# Altium footprint library LimeMicroAltiumLib.PcbLib: 876 footprints (part 10 of 57)
Each footprint in its own frame and in the unit in brackets; x right, y up, seen from the top. Pads: shape width x height; smd on the part's side, far side on the other; paste and mask are expansions set on the pad; w line width, h text height; cw(c..) or ccw(c..) is an arc to the next point about the centre after c.
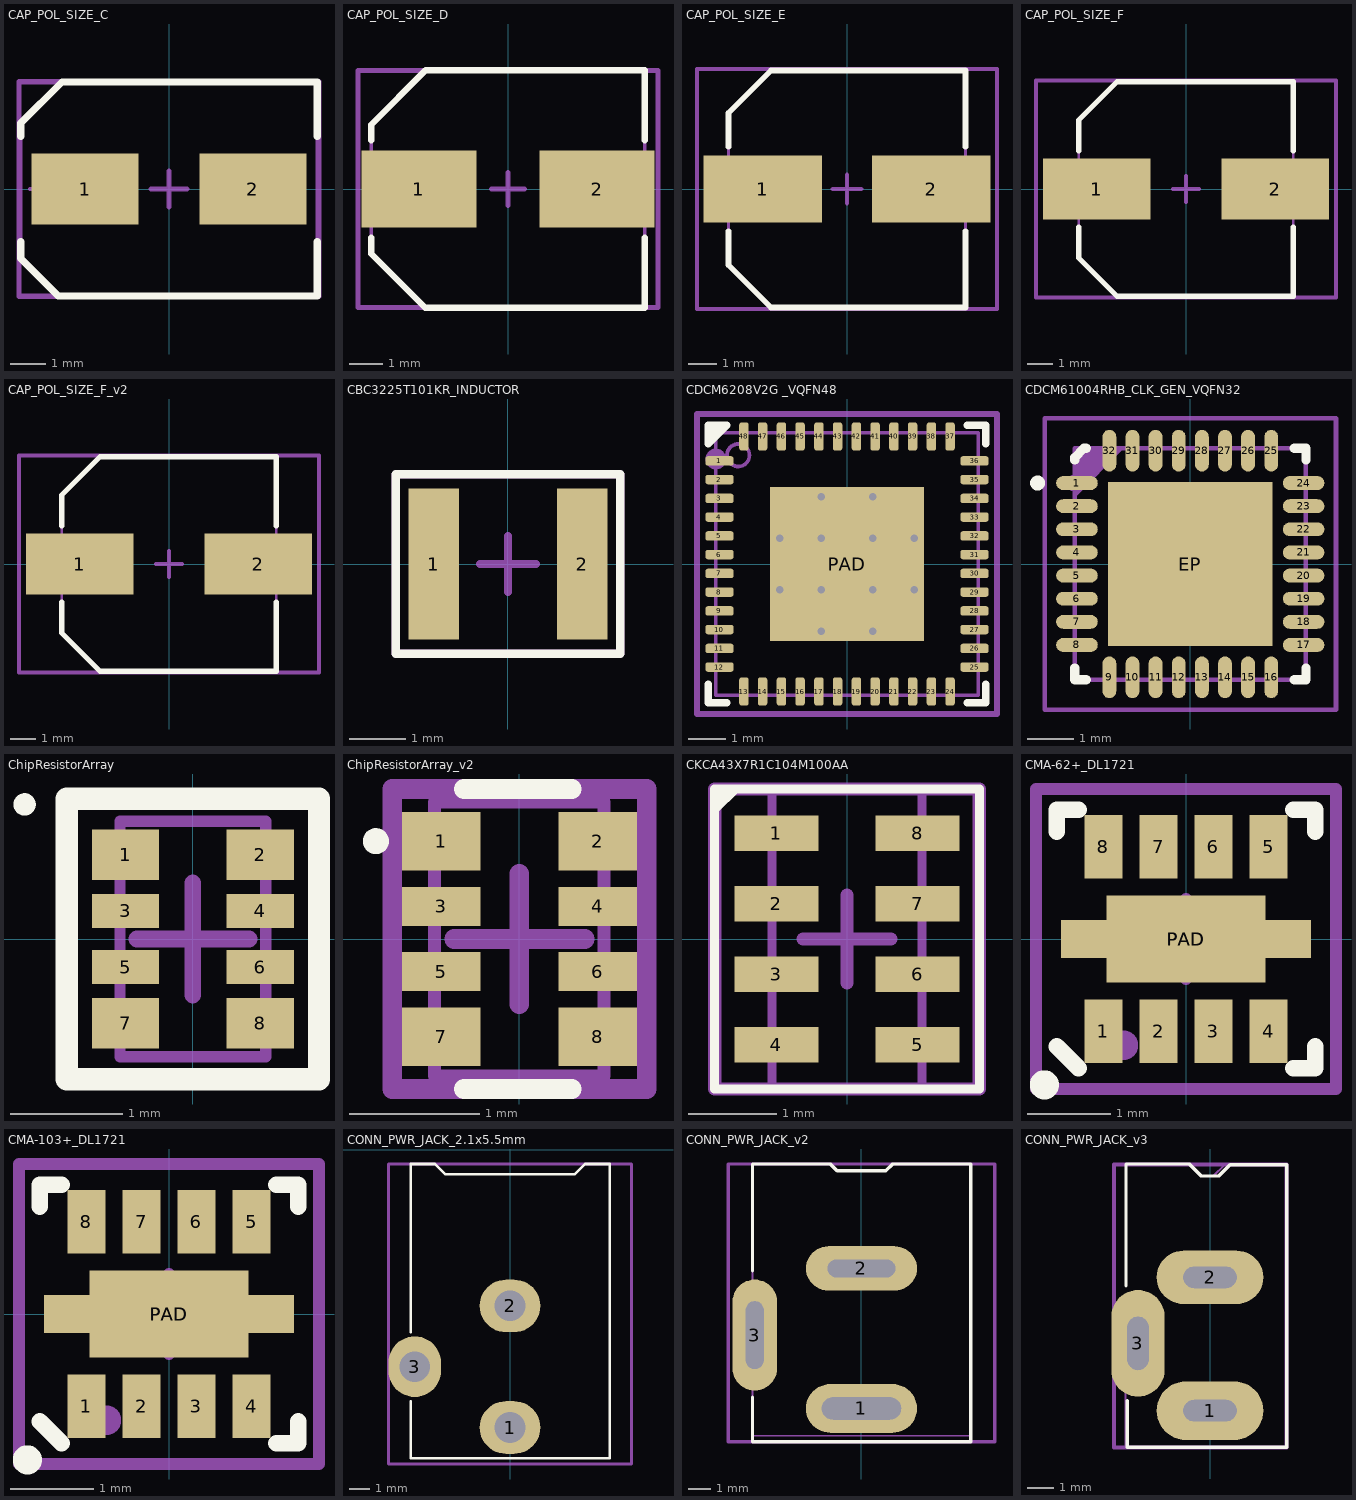
[diagram p9: the footprints below, top view; thin cyan lines are the x and y axes]

## CAP_POL_SIZE_C [mm]
height 10.5
pads (2):
  rect 3x2 smd: 1(-2.35,0) 2(2.35,0)
Top Overlay:
  lines w0.2: -4.15,-1.475 -4.15,-1.95 -3.1,-3 4.15,-3 4.15,-1.475 ; -4.15,1.475 -4.15,1.85 -3,3 4.15,3 4.15,1.475
Mechanical 13:
  lines w0.1: -4.15,-1.95 -4.15,1.85 -3,3 4.15,3 4.15,-3 -3.1,-3 -4.15,-1.95
Mechanical 15:
  lines w0.1: -3.9,0 -2.4,0 ; -3.15,-0.75 -3.15,0.75
  lines w0.15: -0.5,0 0.5,0 ; 0,-0.5 0,0.5 ; -4.2,-3 4.2,-3 4.2,3 -4.2,3 -4.2,-3
  text ".Designator" at 0,0 h0.55
3D body "User Library-capacitor size C.step": height 5.41, standoff -0.01, extent -2.95,-2.65 2.95,2.65

## CAP_POL_SIZE_D [mm]
height 10.5
pads (2):
  rect 3.5x2.35 smd: 1(-2.7,0) 2(2.7,0)
Top Overlay:
  lines w0.2: -4.15,-1.475 -4.15,-1.962 -2.512,-3.6 4.15,-3.6 4.15,-1.475 ; -4.15,1.475 -4.15,1.95 -2.5,3.6 4.15,3.6 4.15,1.475
Mechanical 13:
  lines w0.1: -4.15,-1.95 -4.15,1.95 -2.5,3.6 4.15,3.6 4.15,-3.6 -2.5,-3.6 -4.15,-1.95
Mechanical 15:
  lines w0.1: -3.65,0 -2.15,0 ; -2.9,-0.75 -2.9,0.75
  lines w0.15: -0.5,0 0.5,0 ; 0,-0.5 0,0.5 ; -4.55,-3.6 4.55,-3.6 4.55,3.6 -4.55,3.6 -4.55,-3.6
  text ".Designator" at 0,0 h0.55
3D body "EDK476M035A9GAA.step": height 5.66, standoff 0, extent -3.8,-3.4 3.8,3.4

## CAP_POL_SIZE_E [mm]
height 10.5
pads (2):
  rect 4.15x2.35 smd: 1(-2.95,0) 2(2.95,0)
Top Overlay:
  lines w0.2: -4.15,-1.475 -4.15,-2.663 -2.663,-4.15 4.15,-4.15 4.15,-1.475 ; -4.15,1.475 -4.15,2.662 -2.663,4.15 4.15,4.15 4.15,1.475
Mechanical 13:
  lines w0.1: -4.15,-2.663 -2.663,-4.15 4.15,-4.15 4.15,4.15 -2.663,4.15 -4.15,2.662 -4.15,-2.663
Mechanical 15:
  lines w0.1: -4.9,0 -3.4,0 ; -4.15,-0.75 -4.15,0.75
  lines w0.15: -0.5,0 0.5,0 ; 0,-0.5 0,0.5 ; -5.25,-4.2 -5.25,4.2 5.25,4.2 5.25,-4.2 -5.25,-4.2
  text ".Designator" at 0,0 h0.55
3D body "User Library-capacitor size E.step": height 6.2, standoff -0.01, extent -4.5,-4.15 4.5,4.15

## CAP_POL_SIZE_F [mm]
height 10.5
pads (2):
  rect 4.15x2.35 smd: 1(-3.45,0) 2(3.45,0)
Top Overlay:
  lines w0.2: -4.15,-1.475 -4.15,-2.663 -2.663,-4.15 4.15,-4.15 4.15,-1.475 ; -4.15,1.475 -4.15,2.662 -2.663,4.15 4.15,4.15 4.15,1.475
Mechanical 13:
  lines w0.1: -4.15,-2.663 -2.663,-4.15 4.15,-4.15 4.15,4.15 -2.663,4.15 -4.15,2.662 -4.15,-2.663
Mechanical 15:
  lines w0.1: -4.9,0 -3.4,0 ; -4.15,-0.75 -4.15,0.75
  lines w0.15: -0.5,0 0.5,0 ; 0,-0.5 0,0.5 ; -5.8,-4.2 -5.8,4.2 5.8,4.2 5.8,-4.2 -5.8,-4.2
  text ".Designator" at 0,0 h0.55
3D body "User Library-capacitor size F.step": height 10.21, standoff -0.01, extent -4.95,-4.15 4.95,4.15

## CAP_POL_SIZE_F_v2 [mm]
height 10.5
pads (2):
  rect 4.15x2.35 smd: 1(-3.45,0) 2(3.45,0)
Top Overlay:
  lines w0.2: -4.15,-1.475 -4.15,-2.663 -2.663,-4.15 4.15,-4.15 4.15,-1.475 ; -4.15,1.475 -4.15,2.662 -2.663,4.15 4.15,4.15 4.15,1.475
Mechanical 13:
  lines w0.1: -4.15,-2.663 -4.15,2.662 -2.663,4.15 4.15,4.15 4.15,-4.15 -2.663,-4.15 -4.15,-2.663
Mechanical 15:
  lines w0.1: -4.9,0 -3.4,0 ; -4.15,-0.75 -4.15,0.75
  lines w0.15: -0.5,0 0.5,0 ; 0,-0.5 0,0.5 ; -5.8,-4.2 5.8,-4.2 5.8,4.2 -5.8,4.2 -5.8,-4.2
  text ".Designator" at 0,0 h0.55
3D body "User Library-capasitores electroliticos.step": height 5.55, standoff 0, extent -3.625,-3.3 3.575,3.3

## CBC3225T101KR_INDUCTOR [mm] "Power inductor CBC3225T101KR, 0.34A"
pads (2):
  rect 0.9x2.7 smd mask+0.05: 1(-1.325,0) 2(1.325,0)
Top Overlay:
  lines w0.15: -2,-1.6 2,-1.6 2,1.6 -2,1.6 -2,-1.6
Mechanical 15:
  lines w0.15: -0.5,0 0.5,0 ; 0,-0.5 0,0.5 ; -2,-1.6 2,-1.6 2,1.6 -2,1.6 -2,-1.6
  text ".Designator" at 0,0 h0.55
  text "No polarity" at -1.6,-1.3 h0.3
3D body "User Library-CBC3225.step": height 2.5, standoff 0, extent -1.575,-1.25 1.625,1.25

## CDCM6208V2G _VQFN48 [mm] "48-VQFN package 7x7 mm"
pads (49):
  rrect50% 0.75x0.25 smd mask+0.05: 1(-3.4,2.75) 2(-3.4,2.25) 3(-3.4,1.75) 4(-3.4,1.25) 5(-3.4,0.75) 6(-3.4,0.25) 7(-3.4,-0.25) 8(-3.4,-0.75) 9(-3.4,-1.25) 10(-3.4,-1.75) 11(-3.4,-2.25) 12(-3.4,-2.75) 25(3.4,-2.75) 26(3.4,-2.25) 27(3.4,-1.75) 28(3.4,-1.25) 29(3.4,-0.75) 30(3.4,-0.25) 31(3.4,0.25) 32(3.4,0.75) 33(3.4,1.25) 34(3.4,1.75) 35(3.4,2.25) 36(3.4,2.75)
  rrect50% 0.25x0.75 smd mask+0.05: 13(-2.75,-3.4) 14(-2.25,-3.4) 15(-1.75,-3.4) 16(-1.25,-3.4) 17(-0.75,-3.4) 18(-0.25,-3.4) 19(0.25,-3.4) 20(0.75,-3.4) 21(1.25,-3.4) 22(1.75,-3.4) 23(2.25,-3.4) 24(2.75,-3.4) 37(2.75,3.4) 38(2.25,3.4) 39(1.75,3.4) 40(1.25,3.4) 41(0.75,3.4) 42(0.25,3.4) 43(-0.25,3.4) 44(-0.75,3.4) 45(-1.25,3.4) 46(-1.75,3.4) 47(-2.25,3.4) 48(-2.75,3.4)
  rect 4.1x4.1 smd paste-5 mask+0.05: PAD(0,0)
via 0.685,0.685 diameter 0.4 hole 0.2
via 0.685,1.8 diameter 0.4 hole 0.2
via 1.8,0.685 diameter 0.4 hole 0.2
via -1.8,0.685 diameter 0.4 hole 0.2
via -0.685,1.8 diameter 0.4 hole 0.2
via -0.685,0.685 diameter 0.4 hole 0.2
via -0.685,-0.685 diameter 0.4 hole 0.2
via -0.685,-1.8 diameter 0.4 hole 0.2
via -1.8,-0.685 diameter 0.4 hole 0.2
via 1.8,-0.685 diameter 0.4 hole 0.2
via 0.685,-1.8 diameter 0.4 hole 0.2
via 0.685,-0.685 diameter 0.4 hole 0.2
Top Overlay:
  region: -3.7,3.25 -3.25,3.7 -3.7,3.7
  lines w0.2: -3.7,-3.2 -3.7,-3.7 -3.2,-3.7 ; 3.2,-3.7 3.7,-3.7 3.7,-3.2 ; 3.2,3.7 3.7,3.7 3.7,3.2 ; -3.7,3.2 -3.2,3.7 -3.7,3.7 -3.7,3.2
Top Paste:
  drawing of 9 lines, arcs and shapes, not listed
Mechanical 13:
  circle w0.1: c-2.9,2.9 r0.3
  lines w0.1: -3.5,-3.5 3.5,-3.5 3.5,3.5 -3.5,3.5 -3.5,-3.5
Mechanical 15:
  circle w0.35: c-3.5,2.8 r0.1
  lines w0.15: -0.5,0 0.5,0 ; 0,-0.5 0,0.5 ; -4,-4 4,-4 4,4 -4,4 -4,-4
  text ".Designator" at 0,0 h0.55
3D body "ALSRobot-QFN48 7x7.step": height 0.78, standoff -0.02, extent -3.51,-3.51 3.51,3.51

## CDCM61004RHB_CLK_GEN_VQFN32 [mm]
pads (33):
  oval 0.9x0.3 smd mask+0.05: 1(-2.45,1.75) 2(-2.45,1.25) 3(-2.45,0.75) 4(-2.45,0.25) 5(-2.45,-0.25) 6(-2.45,-0.75) 7(-2.45,-1.25) 8(-2.45,-1.75) 17(2.45,-1.75) 18(2.45,-1.25) 19(2.45,-0.75) 20(2.45,-0.25) 21(2.45,0.25) 22(2.45,0.75) 23(2.45,1.25) 24(2.45,1.75)
  oval 0.3x0.9 smd mask+0.05: 9(-1.75,-2.45) 10(-1.25,-2.45) 11(-0.75,-2.45) 12(-0.25,-2.45) 13(0.25,-2.45) 14(0.75,-2.45) 15(1.25,-2.45) 16(1.75,-2.45) 25(1.75,2.45) 26(1.25,2.45) 27(0.75,2.45) 28(0.25,2.45) 29(-0.25,2.45) 30(-0.75,2.45) 31(-1.25,2.45) 32(-1.75,2.45)
  rect 3.55x3.55 smd paste-0.65 mask+0.05: EP(0,0)
Top Overlay:
  circle w0.25: c-3.3,1.75 r0.035
  lines w0.2: -2.5,-2.25 -2.5,-2.5 -2.25,-2.5 ; -2.5,2.25 -2.5,2.3 -2.3,2.5 -2.25,2.5 ; 2.25,-2.5 2.5,-2.5 2.5,-2.25 ; 2.25,2.5 2.5,2.5 2.5,2.25
Mechanical 13:
  lines w0.1: -2.5,1.5 -1.5,2.5 ; -2.5,1.6 -1.6,2.5 ; -2.5,1.7 -1.7,2.5 ; -2.5,1.8 -1.8,2.5 ; -2.5,1.9 -1.9,2.5 ; -2.5,2 -2,2.5 ; -2.5,2.1 -2.1,2.5 ; -2.5,2.2 -2.2,2.5 ; -2.5,2.3 -2.3,2.5 ; -2.5,2.4 -2.4,2.5 ; -2.5,-2.5 2.5,-2.5 2.5,2.5 -2.5,2.5 -2.5,-2.5
Mechanical 15:
  circle w0.2: c-2.525,1.75 r0.071
  lines w0.1: -0.5,0 0.5,0 ; 0,-0.5 0,0.5 ; -3.15,-3.15 3.15,-3.15 3.15,3.15 -3.15,3.15 -3.15,-3.15
  text ".Designator" at 0,0 h0.55
3D body "QFN50P500X500X100-33N-S355.stp": height 1, standoff 0, extent -2.5,-2.5 2.5,2.5

## ChipResistorArray [mm] "Chip Array, Flat, 8-Leads, Pitch 0,60mm,  Body 2,05x1,05mm,  IPC Medium Density"
height 0.5
pads (8):
  rect 0.6x0.45 smd mask+0.05: 1(-0.6,0.75) 2(0.6,0.75) 7(-0.6,-0.75) 8(0.6,-0.75)
  rect 0.6x0.3 smd mask+0.05: 3(-0.6,0.25) 4(0.6,0.25) 5(-0.6,-0.25) 6(0.6,-0.25)
Top Overlay:
  circle w0.1: c-1.5,1.2 r0.05
  lines w0.2: -1.125,-1.25 1.125,-1.25 1.125,1.25 -1.125,1.25 -1.125,-1.25
Top Solder:
  region: 0.25,-1.025 0.25,1.025 0.95,1.025 0.95,-1.025
  region: -0.95,-1.025 -0.95,1.025 -0.25,1.025 -0.25,-1.025
Mechanical 13:
  lines w0.1: -0.65,-1.05 0.65,-1.05 0.65,1.05 -0.65,1.05 -0.65,-1.05
Mechanical 15:
  lines w0.15: -0.5,0 0.5,0 ; 0,-0.5 0,0.5 ; -1.1,-1.25 1.1,-1.25 1.1,1.25 -1.1,1.25 -1.1,-1.25
  text ".Designator" at 0,0 h0.55
3D body "User Library-CAT10-103.STEP": height 0.4, standoff 0, extent -0.525,-1.025 0.475,0.975

## ChipResistorArray_v2 [mm] "Chip Array, Flat, 8-Leads, Pitch 0,60mm,  Body 2,05x1,05mm,  IPC Medium Density"
height 0.5
pads (8):
  rect 0.6x0.45 smd mask+0.01: 1(-0.6,0.75) 2(0.6,0.75) 7(-0.6,-0.75) 8(0.6,-0.75)
  rect 0.6x0.3 smd mask+0.01: 3(-0.6,0.25) 4(0.6,0.25) 5(-0.6,-0.25) 6(0.6,-0.25)
Top Overlay:
  circle w0.1: c-1.1,0.75 r0.05
  lines w0.15: -0.425,-1.15 0.4,-1.15 ; -0.425,1.15 0.4,1.15
Mechanical 13:
  lines w0.1: -0.65,-1.05 -0.65,1.05 0.65,1.05 0.65,-1.05 -0.65,-1.05
Mechanical 15:
  circle w0.1: c-0.6,0.75 r0.05
  lines w0.15: -0.5,0 0.5,0 ; 0,-0.5 0,0.5 ; -0.975,-1.15 -0.975,1.15 0.975,1.15 0.975,-1.15 -0.975,-1.15
  text ".Designator" at 0,0 h0.55
3D body "User Library-CAT10-103.STEP": height 0.4, standoff 0, extent -0.525,-1.025 0.475,0.975

## CKCA43X7R1C104M100AA [mm]
height 1
pads (8):
  rect 0.95x0.4 smd: 1(-0.8,1.2) 2(-0.8,0.4) 3(-0.8,-0.4) 4(-0.8,-1.2) 5(0.8,-1.2) 6(0.8,-0.4) 7(0.8,0.4) 8(0.8,1.2)
Top Overlay:
  region: -1.5,1.4 -1.2,1.7 -1.5,1.7
  lines w0.1: -1.5,-1.7 1.5,-1.7 1.5,1.7 -1.5,1.7 -1.5,-1.7
Mechanical 13:
  lines w0.1: -0.85,-1.7 -0.85,1.7 0.85,1.7 0.85,-1.7 -0.85,-1.7
Mechanical 15:
  circle w0.15: c-0.9,1.2 r0.05
  lines w0.15: -0.5,0 0.5,0 ; 0,-0.5 0,0.5 ; -1.5,-1.7 -1.5,1.7 1.5,1.7 1.5,-1.7 -1.5,-1.7
  text ".Designator" at 0,0 h0.55
3D body "User Library-TC164.step": height 0.55, standoff 0, extent -0.8,-1.6 0.8,1.6

## CMA-62+_DL1721 [mm] "Quad Flat No Lead, Plastic; 16 Terminals; Body 3 x 3 mm; Pitch 0.5 mm"
height 0.8
pads (10):
  rect 0.46x0.76 smd mask+0.05: 1(-0.99,-1.105) 2(-0.33,-1.105) 3(0.33,-1.105) 4(0.99,-1.105) 5(0.99,1.105) 6(0.33,1.105) 7(-0.33,1.105) 8(-0.99,1.105)
  rect 3x0.46 smd mask+0.05: PAD(0,0)
  rect 1.91x1.04 smd mask+0.05: PAD(0,0)
Top Overlay:
  circle w0.25: c-1.7,-1.75 r0.05
  lines w0.2: -1.55,-1.29 -1.29,-1.55 ; -1.55,1.29 -1.55,1.55 -1.29,1.55 ; 1.29,-1.55 1.55,-1.55 1.55,-1.29 ; 1.29,1.55 1.55,1.55 1.55,1.29
Mechanical 15:
  circle w0.3: c-0.75,-1.275 r0.025
  lines w0.15: -0.475,0 0,0 ; 0,-0.475 0,0 ; 0,0.475 0,0 ; 0.475,0 0,0 ; -1.8,-1.8 -1.8,1.8 1.8,1.8 1.8,-1.8 -1.8,-1.8
  text ".Designator" at 0,0 h0.55
3D body "User Library-DFN-8.STEP": height 0.8, standoff 0, extent -1.5,-1.51 1.5,1.51

## CMA-103+_DL1721 [mm] "Quad Flat No Lead, Plastic; 16 Terminals; Body 3 x 3 mm; Pitch 0.5 mm"
height 0.8
pads (10):
  rect 0.46x0.76 smd mask+0.05: 1(-0.99,-1.105) 2(-0.33,-1.105) 3(0.33,-1.105) 4(0.99,-1.105) 5(0.99,1.105) 6(0.33,1.105) 7(-0.33,1.105) 8(-0.99,1.105)
  rect 3x0.46 smd mask+0.05: PAD(0,0)
  rect 1.91x1.04 smd mask+0.05: PAD(0,0)
Top Overlay:
  circle w0.25: c-1.7,-1.75 r0.05
  lines w0.2: -1.55,-1.29 -1.29,-1.55 ; -1.55,1.29 -1.55,1.55 -1.29,1.55 ; 1.29,-1.55 1.55,-1.55 1.55,-1.29 ; 1.29,1.55 1.55,1.55 1.55,1.29
Mechanical 15:
  circle w0.3: c-0.75,-1.275 r0.025
  lines w0.15: -0.475,0 0,0 ; 0,-0.475 0,0 ; 0,0.475 0,0 ; 0.475,0 0,0 ; -1.8,-1.8 -1.8,1.8 1.8,1.8 1.8,-1.8 -1.8,-1.8
  text ".Designator" at 0,0 h0.55
3D body "User Library-DFN-8.STEP": height 0.8, standoff 0, extent -1.5,-1.51 1.5,1.51

## CONN_PWR_JACK_2.1x5.5mm [mm] "Power Connector, 2.1mm ID, 5.5mm OD"
height 11
pads (3):
  oval 3x2.6 hole 1.511: 1(0,-13.7) 2(0,-7.7)
  oval 2.6x3 hole 1.511: 3(-4.7,-10.7)
Top Overlay:
  lines w0.127: -4.9,-12.4 -4.9,-15.225 4.925,-15.225 4.925,-0.7 3.7,-0.7 3.2,-1.2 -3.2,-1.2 -3.7,-0.7 -4.9,-0.7 -4.9,-9
Mechanical 13:
  lines w0.076: -4.9,-12.4 -4.9,-15.225 4.925,-15.225 4.925,-0.7 3.7,-0.7 3.2,-1.2 -3.2,-1.2 -3.7,-0.7 -4.9,-0.7 -4.9,-9
Mechanical 15:
  lines w0.15: -6,-15.5 6,-15.5 6,-0.7 -6,-0.7 -6,-15.5
  text ".Designator" at 0,-7.7 h0.55
3D body "3100-522 Connector.stp": height 11, standoff -3.5, extent -4.9,-14.1 4.5,0

## CONN_PWR_JACK_v2 [mm] "Power Connector, 2.1mm ID, 5.5mm OD"
height 11
pads (3):
  oval 5x2.2 hole 1 slot 3.56 at 0 deg: 1(0,-14)
  oval 5x2 hole 0.8 slot 3.05 at 0 deg: 2(0,-7.7)
  oval 2x5 hole 0.8 slot 3.05 at 90 deg: 3(-4.8,-10.7)
Top Overlay:
  lines w0.15: -4.9,-13.5 -4.9,-15.5 4.925,-15.5 4.925,-3 1.4,-3 1.1,-3.3 -1.1,-3.3 -1.4,-3 -4.9,-3 -4.9,-7.8
Mechanical 13:
  lines w0.076: -4.9,-12.4 -4.9,-15.225 4.925,-15.225 4.925,-3 1.4,-3 1.1,-3.3 -1.1,-3.3 -1.4,-3 -4.9,-3 -4.9,-9
Mechanical 15:
  lines w0.15: -6,-15.5 -6,-3 6,-3 6,-15.5 -6,-15.5
  text ".Designator" at -0.1,-9 h0.55
3D body "3100-522 Connector.stp": height 11, standoff -3.5, extent -4.9,-14.1 4.5,0

## CONN_PWR_JACK_v3 [mm]
height 7.4
pads (3):
  oval 4x2.2 hole 0.8 slot 2 at 0 deg: 1(0,-13.675)
  oval 4x2 hole 0.8 slot 2 at 0 deg: 2(0,-8.675)
  oval 2x4 hole 0.8 slot 2 at 90 deg: 3(-2.7,-11.15)
Top Overlay:
  lines w0.127: -3.15,-9 -3.15,-4.425 -0.775,-4.425 -0.325,-4.875 0.325,-4.875 0.75,-4.45 2.875,-4.45 2.875,-15.05 -3.1,-15.05 -3.1,-13.3
Mechanical 13:
  lines w0.076: -3.175,-12.4 -3.175,-15.05 2.9,-15.05 2.9,-4.45 0.55,-4.45 0.125,-4.875 -0.325,-4.875 -0.775,-4.425 -3.15,-4.425 -3.15,-9
Mechanical 15:
  lines w0.15: -3.6,-15.05 -3.6,-4.45 2.875,-4.45 2.875,-15.05 -3.6,-15.05
  text ".Designator" at -0.1,-9 h0.55
3D body "pj-031dh.stp": height 7.4, standoff -3.2, extent -2.85,-14.025 2.55,-2.425